# Altium schematic symbol library S_D.SchLib: 61 symbols (part 3 of 3)
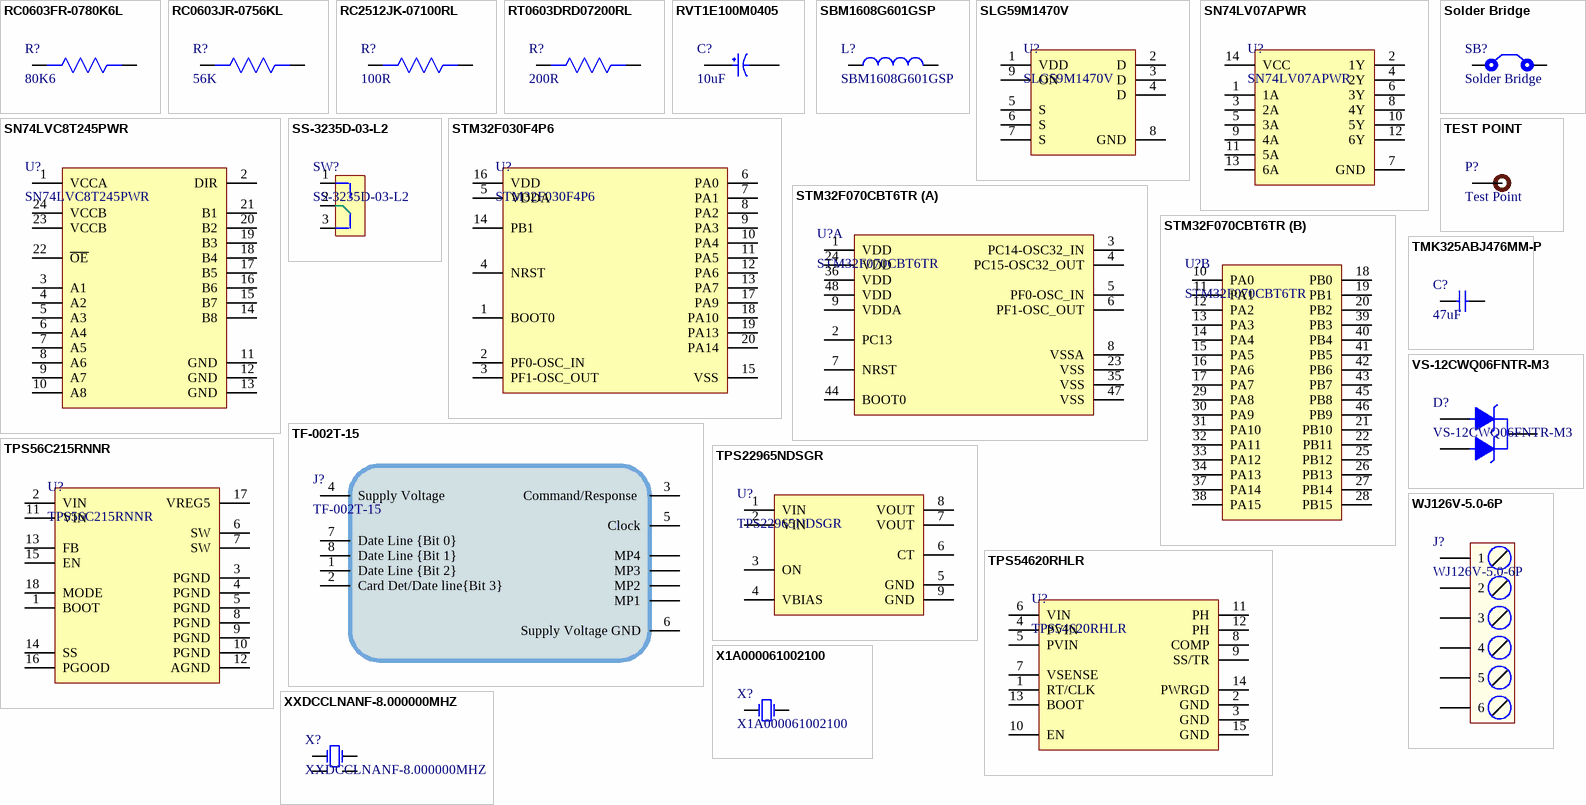
[diagram p3: symbols RC0603FR-0780K6L to XXDCCLNANF-8.000000MHZ]

## TPS54620RHLR
designator U?
IC REG BUCK ADJUSTABLE 6A 14VQFN; Manufacturer: Texas Instruments; Number of Outputs: 1; Output Voltage: 15V; Min Input Voltage: 1.6V; Max Input Voltage: 17V; Switching Frequency: 1.6MHz; Min Supply Voltage: 4.5V; Synchronous Rectifier: Yes; Min Output Voltage: 800mV; Quiescent Current: 600uA; Supplier 1: Digi-Key; Manufacturer Part Number: TPS54620RHLR; RoHS: Yes; Category: Voltage Regulators - Switching; Pricing 1: 1=5.80000, 10=5.20700, 25=4.92280, 100=4.26630, 250=4.04752, 500=3.63182, 1000=3.61200 (USD); Mount: Surface Mount; Case/Package: QFN; Number of Pins: 14; Contact Plating: Gold; Min Operating Temperature: -40°C; Max Operating Temperature: 150°C; Max Output Current: 6A; Operating Supply Voltage: 17V; Output Current: 6A; Packaging: Tape and Reel; Package Quantity: 3000; Max Output Voltage: 15V; Output Type: Adjustable; Series: SWIFT™; Length: 3.65mm; Width: 3.65mm; Height: 0.95mm; Radiation Hardening: No; REACH SVHC: No SVHC; Lead Free: Lead Free; RoHS Compliant: Yes; ComponentLink1URL: https://datasheet.ciiva.com/2026/tps54620-2026364.pdf?src-supplier=Digi-Key; ComponentLink1Description: https://datasheet.ciiva.com/2026/tps54620-2026364.pdf?src-supplier=Digi-Key; ComponentLink2URL: https://datasheet.ciiva.com/22716/1781687-22716300.pdf?src-supplier=Element14; ComponentLink2Description: https://datasheet.ciiva.com/22716/1781687-22716300.pdf?src-supplier=Element14; ComponentLink3URL: https://datasheet.ciiva.com/2026/tps54620-2026365.pdf?src-supplier=Digi-Key; ComponentLink3Description: https://datasheet.ciiva.com/2026/tps54620-2026365.pdf?src-supplier=Digi-Key; ComponentLink4URL: https://datasheet.ciiva.com/26101/tps54620-26101515.pdf?src-supplier=Avnet+Europe; ComponentLink4Description: https://datasheet.ciiva.com/26101/tps54620-26101515.pdf?src-supplier=Avnet+Europe; ComponentLink5URL: https://datasheet.ciiva.com/3221/tps54620-3221357.pdf?src-supplier=Avnet; ComponentLink5Description: https://datasheet.ciiva.com/3221/tps54620-3221357.pdf?src-supplier=Avnet; ComponentLink6URL: https://datasheet.ciiva.com/2026/tps54620-2026366.pdf?src-supplier=Digi-Key; ComponentLink6Description: https://datasheet.ciiva.com/2026/tps54620-2026366.pdf?src-supplier=Digi-Key; Supplier Part Number 1: 296-28831-1-ND
footprint 14-VQFN (3.5x3.5)
pins: 1 RT/CLK, 2 GND, 3 GND, 4 PVIN, 5 PVIN, 6 VIN, 7 VSENSE, 8 COMP, 9 SS/TR, 10 EN, 11 PH, 12 PH, 13 BOOT, 14 PWRGD, 15 GND

## VS-12CWQ06FNTR-M3
designator D?
Schottky Rectifier, 60 V, 12 A, Dual Common Cathode, TO-252AA; Manufacturer: Vishay Semiconductors; Forward Voltage: 790mV; Forward Current: 12A; Max Reverse Current: 3mA; Average Rectified Current: 6A; Max Repetitive Reverse Voltage (Vrrm): 60V; Peak Non-Repetitive Surge Current: 320A; Supplier 1: Avnet; Manufacturer Part Number: VS-12CWQ06FNTR-M3; RoHS: Yes; Category: Rectifier Diodes; Stock 1: 119; Pricing 1: 1=1.14000, 10=1.03000, 25=0.97800, 50=0.92000, 100=0.86500, 250=0.81400, 500=0.77000 (USD); Mount: Surface Mount; Case/Package: TO-252AA; Number of Pins: 3; Min Operating Temperature: -55°C; Max Operating Temperature: 150°C; Packaging: Tape and Reel; Element Configuration: Common Cathode; Max Forward Surge Current (Ifsm): 320A; Max Reverse Voltage (DC): 60V; Series: -; REACH SVHC: No SVHC; RoHS Compliant: Yes; ComponentLink1URL: https://datasheet.ciiva.com/8289/12cwq06f-8289149.pdf?src-supplier=Avnet; ComponentLink1Description: https://datasheet.ciiva.com/8289/12cwq06f-8289149.pdf?src-supplier=Avnet; Supplier Part Number 1: 99Y8339
footprint VS-12CWQ06FNTR-M3 (DIODE ARRAY SCHOTTKY 60V 6A DPAK)
pins: 1 ANODE, 3 ANODE, 4 CATHODE

## WJ126V-5.0-6P
designator J?
P=5.0mm Screw terminal ROHS; Manufacturer: Ningbo Kangnex Elec; Manufacturer Part No: WJ126V-5.0-6P; Package: Custom; ComponentLink1Description: LCSC; ComponentLink1URL: https://www.lcsc.com/product-detail/Screw-span-style-background-color-ff0-terminal-span_Ningbo-Kangnex-Elec-WJ126V-5-0-6P_C8379.html
footprint WJ126V-5.0-6P
pins: 1, 2, 3, 4, 5, 6

## X1A000061002100
designator X?
-40℃~85℃ 32768Hz 贴片无源晶振 ±20ppm 90kΩ 6pF SMD2012-2P Crystals ROHS /; Manufacturer: Seiko Epson; Value: Custom; Manufacturer Part No: X1A000061002100; ComponentLink1Description: LCSC; ComponentLink1URL: https://www.lcsc.com/product-detail/Crystals_Seiko-Epson-X1A000061002100_C255767.html; Package: Custom
footprint X1A000061002100
pins: 1 OSC1, 2 OSC2

## XXDCCLNANF-8.000000MHZ
designator X?
12pF -40℃~85℃ 贴片无源晶振 ±20ppm 8000000Hz SMD3225-4P Crystals ROHS /; Manufacturer: TAITIEN Elec; Pakage: Custom; Manufacturer Part No: XXDCCLNANF-8.000000MHZ; Value: 8000000Hz; ComponentLink1Description: LCSC; ComponentLink1URL: https://www.lcsc.com/product-detail/Crystals_TAITIEN-Elec-XXDCCLNANF-8-000000MHZ_C521664.html
footprint XXDCCLNANF-8.000000MHZ
pins: 1 OSC1, 2 GND, 3 OSC2, 4 GND